# Altium schematic symbol library TLP185GR-TPL,SE.SchLib: 1 symbol
Pins are listed as number, name and electrical type; pins without a type are passive.

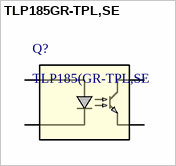
[diagram p0: symbol TLP185GR-TPL,SE]

## TLP185GR-TPL,SE
designator Q?, comment TLP185(GR-TPL,SE
Photocoupler (phototransistor output), DC input, 3750 Vrms, 4pin SO6; Manufacturer_Name: Toshiba Electronic Devices & Storage Corp.; Source_Package: TLP185_SE; Number_devices_in_Package: 1; Copyright: Copyright (C) 2026 Ultra Librarian. All rights reserved.; Manufacturer_Part_Number: TLP185(GR-TPL,SE; RefDes: Refdes; Type: Type
footprint 4pin SO6_TOS
pins: 1 Anode, 3 Cathode, 4 Emitter, 6 Collector